# Altium footprint library WE-RJ45 LAN.PcbLib: 106 footprints (part 3 of 7)
Each footprint in its own frame and in the unit in brackets; x right, y up, seen from the top. Pads: shape width x height; smd on the part's side, far side on the other; paste and mask are expansions set on the pad; w line width, h text height; cw(c..) or ccw(c..) is an arc to the next point about the centre after c.
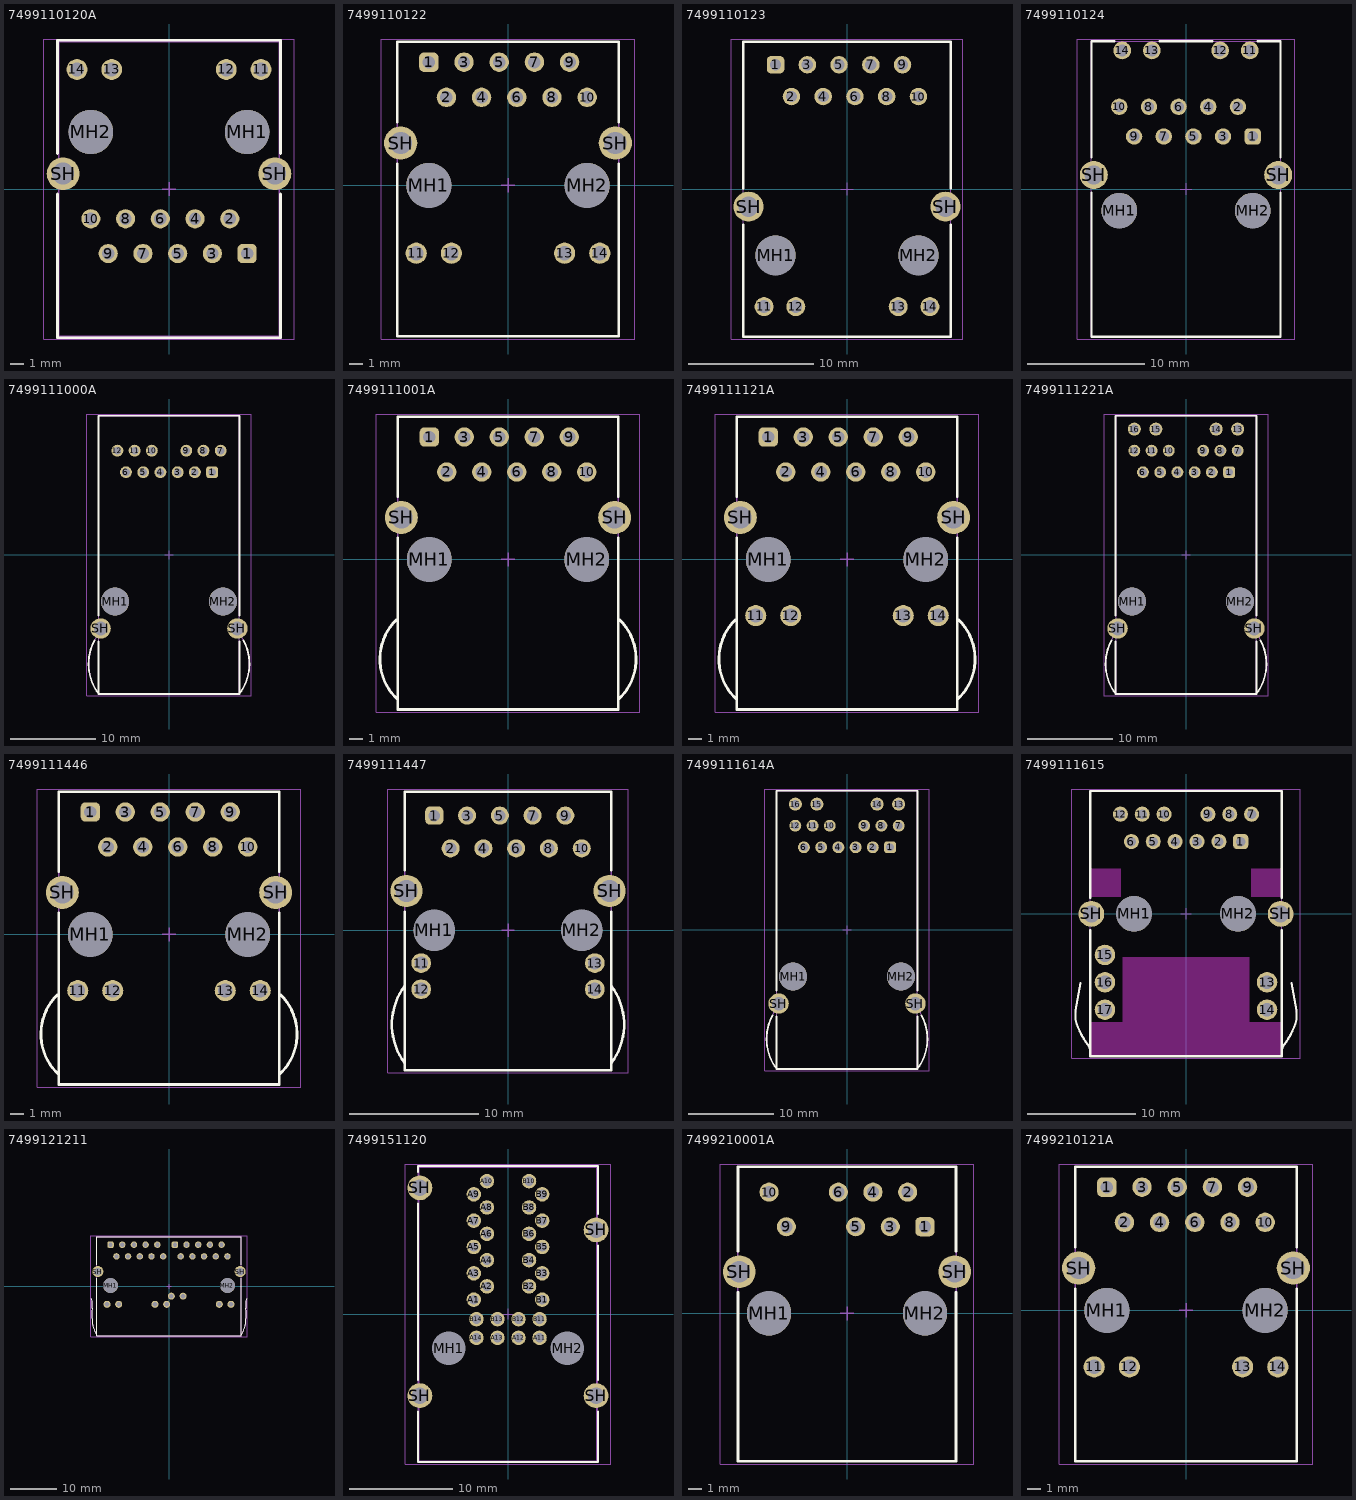
[diagram p2: the footprints below, top view; thin cyan lines are the x and y axes]

## 7499110120A [mm] "LAN Transformer, body 21.54 x 16.10 mm"
height 16.65
pads (18):
  rrect50% 1.4x1.4 hole 0.9: 1(5.715,-4.72)
  round 1.4 hole 0.9: 2(4.445,-2.18) 3(3.175,-4.72) 4(1.905,-2.18) 5(0.635,-4.72) 6(-0.635,-2.18) 7(-1.905,-4.72) 8(-3.175,-2.18) 9(-4.445,-4.72) 10(-5.715,-2.18)
  round 1.52 hole 1.02: 11(6.73,8.74) 12(4.19,8.74) 13(-4.19,8.74) 14(-6.73,8.74)
  round 3.25 hole 3.25 unplated: MH1(5.715,4.17) MH2(-5.715,4.17)
  round 2.4 hole 1.6: SH(-7.745,1.12) SH(7.745,1.12)
Top Overlay:
  lines w0.2: -8.15,-0.36 -8.15,-10.87 8.15,-10.87 8.15,-0.36 ; -8.15,2.6 -8.15,10.87 8.15,10.87 8.15,2.6
Top Assembly:
  lines w0.1: -8.05,-10.77 8.05,-10.77 8.05,10.77 -8.05,10.77 -8.05,-10.77
Top Designator:
  text ".Designator" at -3.647,-0.357 h1
Top 3D Body:
  lines w0.1: -8.05,-10.77 8.05,-10.77 8.05,10.77 -8.05,10.77 -8.05,-10.77
Top Courtyard:
  lines w0.05: -9.145,-10.97 9.145,-10.97 9.145,10.97 -9.145,10.97 -9.145,-10.97
Top Component Center:
  lines w0.1: -0.5,0 0.5,0 ; 0,-0.5 0,0.5
3D body "7499110120A.stp": height 16.69, standoff -3.3, extent -8.34,-10.77 8.34,10.77

## 7499110122 [mm] "Integrated RJ45 Transformer, THT, body 16.00 x 21.25 mm"
height 13.5
pads (18):
  rrect50% 1.4x1.4 hole 0.9: 1(-5.715,8.89)
  round 1.4 hole 0.9: 2(-4.445,6.35) 3(-3.175,8.89) 4(-1.905,6.35) 5(-0.635,8.89) 6(0.635,6.35) 7(1.905,8.89) 8(3.175,6.35) 9(4.445,8.89) 10(5.715,6.35)
  round 1.53 hole 1.03: 11(-6.625,-4.9) 12(-4.085,-4.9) 13(4.085,-4.9) 14(6.625,-4.9)
  round 3.25 hole 3.25 unplated: MH1(-5.715,0) MH2(5.715,0)
  round 2.4 hole 1.6: SH(-7.745,3.05) SH(7.745,3.05)
Top Overlay:
  lines w0.2: -8,1.55 -8,-10.89 8,-10.89 8,1.55 ; -8,4.55 -8,10.36 8,10.36 8,4.55
Top Assembly:
  lines w0.1: -8,-10.89 8,-10.89 8,10.36 -8,10.36 -8,-10.89
Top Designator:
  text ".Designator" at -3.647,-0.357 h1
Top 3D Body:
  lines w0.1: -8,-10.89 8,-10.89 8,10.36 -8,10.36 -8,-10.89
Top Courtyard:
  lines w0.05: -9.145,-11.09 9.145,-11.09 9.145,10.56 -9.145,10.56 -9.145,-11.09
Top Component Center:
  lines w0.1: -0.5,0 0.5,0 ; 0,-0.5 0,0.5
3D body "7499110122.stp": height 13.5, standoff -3.6, extent -8.15,-10.89 8.15,10.36

## 7499110123 [mm] "LAN Transformer, body 23.6x16.6mm"
height 17.1
pads (18):
  rrect50% 1.4x1.4 hole 0.89: 1(-5.715,9.94)
  round 1.4 hole 0.89: 2(-4.445,7.4) 3(-3.175,9.94) 4(-1.905,7.4) 5(-0.635,9.94) 6(0.635,7.4) 7(1.905,9.94) 8(3.175,7.4) 9(4.445,9.94) 10(5.715,7.4)
  round 1.52 hole 1.02: 11(-6.635,-9.41) 12(-4.095,-9.41) 13(4.095,-9.41) 14(6.635,-9.41)
  round 3.2 hole 3.2 unplated: MH1(-5.715,-5.3) MH2(5.715,-5.3)
  round 2.4 hole 1.63: SH(-7.875,-1.41) SH(7.875,-1.41)
Top Overlay:
  lines w0.2: -8.3,-2.85 -8.3,-11.8 8.3,-11.8 8.3,-2.85 ; -8.3,0.05 -8.3,11.8 8.3,11.8 8.3,0.05
Top Assembly:
  lines w0.1: -8.3,-11.8 8.3,-11.8 8.3,11.8 -8.3,11.8 -8.3,-11.8
Top Designator:
  text ".Designator" at -3.647,-0.357 h1
Top 3D Body:
  lines w0.1: -8.3,-11.8 8.3,-11.8 8.3,11.8 -8.3,11.8 -8.3,-11.8
Top Courtyard:
  lines w0.05: -9.275,-12 9.275,-12 9.275,12 -9.275,12 -9.275,-12
Top Component Center:
  lines w0.1: -0.5,0 0.5,0 ; 0,-0.5 0,0.5
3D body "7499110123.stp": height 17.15, standoff -2.75, extent -8.3,-11.8 8.3,11.8

## 7499110124 [mm] "LAN Transformer, body 25.3x16.2mm"
height 13.5
pads (18):
  rrect50% 1.4x1.4 hole 0.9: 1(5.715,4.5)
  round 1.4 hole 0.9: 2(4.445,7.04) 3(3.175,4.5) 4(1.905,7.04) 5(0.635,4.5) 6(-0.635,7.04) 7(-1.905,4.5) 8(-3.175,7.04) 9(-4.445,4.5) 10(-5.715,7.04)
  round 1.52 hole 1.02: 11(5.465,11.87) 12(2.925,11.87) 13(-2.925,11.87) 14(-5.465,11.87)
  round 3.05 hole 3.05 unplated: MH1(-5.715,-1.85) MH2(5.715,-1.85)
  round 2.4 hole 1.6: SH(-7.9,1.2) SH(7.9,1.2)
Top Overlay:
  lines w0.2: -8.1,-0.3 -8.1,-12.65 8.1,-12.65 8.1,-0.3 ; -8.1,2.7 -8.1,12.65 -6.15,12.65 ; -2.24,12.65 2.24,12.65 ; 6.15,12.65 8.1,12.65 8.1,2.7
Top Assembly:
  lines w0.1: -8.1,-12.65 -8.1,12.65 8.1,12.65 8.1,-12.65 -8.1,-12.65
Top Designator:
  text ".Designator" at -3.647,-0.357 h1
Top 3D Body:
  lines w0.1: -8.1,-12.65 -8.1,12.65 8.1,12.65 8.1,-12.65 -8.1,-12.65
Top Courtyard:
  lines w0.05: -9.3,-12.85 -9.3,12.85 9.3,12.85 9.3,-12.85 -9.3,-12.85
Top Component Center:
  lines w0.1: -0.5,0 0.5,0 ; 0,-0.5 0,0.5
3D body "7499110124.stp": height 13.6, standoff -3.45, extent -8.2,-12.65 8.2,12.65

## 7499111000A [mm] "LAN Transformer, body 33.02x16.79mm"
height 15.79
pads (16):
  rrect50% 1.4x1.4 hole 0.9: 1(5.08,9.74)
  round 1.4 hole 0.9: 2(3.05,9.74) 3(1.02,9.74) 4(-1.01,9.74) 5(-3.04,9.74) 6(-5.07,9.74) 7(6.095,12.28) 8(4.065,12.28) 9(2.035,12.28) 10(-2.025,12.28) 11(-4.055,12.28) 12(-6.085,12.28)
  round 3.3 hole 3.3 unplated: MH1(-6.35,-5.5) MH2(6.35,-5.5)
  round 2.4 hole 1.6: SH(-8.065,-8.68) SH(8.065,-8.68)
Top Overlay:
  lines w0.2: -8.776,-10.059 ccw(c-3.579,-12.857) -8.3,-16.4 ; -8.3,-10.2 -8.3,-16.4 ; -8.3,-7.16 -8.3,16.4 8.3,16.4 8.3,-7.16 ; 8.3,-10.2 8.3,-16.4 ; 8.776,-10.059 cw(c3.579,-12.857) 8.3,-16.4 ; -8.3,-16.4 8.3,-16.4
Top Assembly:
  lines w0.1: -8.3,-9.315 ccw(c-3.579,-12.857) -8.3,-16.4 ; 8.3,-9.315 cw(c3.579,-12.857) 8.3,-16.4 ; -8.3,-16.4 -8.3,16.4 8.3,16.4 8.3,-16.4 ; -8.3,-16.4 8.3,-16.4
Top Designator:
  text ".Designator" at -3.647,-0.357 h1
Top 3D Body:
  lines w0.1: -8.3,-9.315 ccw(c-3.579,-12.857) -8.3,-16.4 ; 8.3,-9.315 cw(c3.579,-12.857) 8.3,-16.4 ; -8.3,-16.4 -8.3,16.4 8.3,16.4 8.3,-16.4 ; -8.3,-16.4 8.3,-16.4
Top Courtyard:
  lines w0.05: -9.693,-16.6 -9.693,16.6 9.693,16.6 9.693,-16.6 -9.693,-16.6
Top Component Center:
  lines w0.1: -0.5,0 0.5,0 ; 0,-0.5 0,0.5
3D body "7499111000A.stp": height 15.39, standoff -3.1, extent -9.493,-16.4 9.493,16.4

## 7499111001A [mm] "Integrated RJ45 Transformer, THT, body 16.00 x 21.25 mm"
height 13.5
pads (14):
  rrect50% 1.4x1.4 hole 0.9: 1(-5.715,8.89)
  round 1.4 hole 0.9: 2(-4.445,6.35) 3(-3.175,8.89) 4(-1.905,6.35) 5(-0.635,8.89) 6(0.635,6.35) 7(1.905,8.89) 8(3.175,6.35) 9(4.445,8.89) 10(5.715,6.35)
  round 3.25 hole 3.25 unplated: MH1(-5.715,0) MH2(5.715,0)
  round 2.4 hole 1.6: SH(-7.745,3.05) SH(7.745,3.05)
Top Overlay:
  lines w0.2: -8.099,-4.377 ccw(c-5.31,-7.23) -8.001,-10.176 ; -8,1.55 -8,-10.89 8,-10.89 8,1.55 ; -8,4.55 -8,10.36 8,10.36 8,4.55 ; 8.001,-10.176 ccw(c5.31,-7.23) 8.099,-4.377
Top Assembly:
  lines w0.1: -8.099,-4.377 ccw(c-5.31,-7.23) -8.001,-10.176 ; 8.001,-10.176 ccw(c5.31,-7.23) 8.099,-4.377 ; -8,-10.89 8,-10.89 8,10.36 -8,10.36 -8,-10.89
Top Designator:
  text ".Designator" at -3.647,-0.357 h1
Top 3D Body:
  lines w0.1: -8.099,-4.377 ccw(c-5.31,-7.23) -8.001,-10.176 ; 8.001,-10.176 ccw(c5.31,-7.23) 8.099,-4.377 ; -8,-10.89 8,-10.89 8,10.36 -8,10.36 -8,-10.89
Top Courtyard:
  lines w0.05: -9.548,-11.09 9.548,-11.09 9.548,10.56 -9.548,10.56 -9.548,-11.09
Top Component Center:
  lines w0.1: -0.5,0 0.5,0 ; 0,-0.5 0,0.5
3D body "7499111001A.stp": height 14.85, standoff -3.6, extent -9.348,-10.89 9.348,10.36

## 7499111121A [mm] "Integrated RJ45 Transformer, THT, body 16.00 x 21.25 mm"
height 13.5
pads (18):
  rrect50% 1.4x1.4 hole 0.9: 1(-5.715,8.89)
  round 1.4 hole 0.9: 2(-4.445,6.35) 3(-3.175,8.89) 4(-1.905,6.35) 5(-0.635,8.89) 6(0.635,6.35) 7(1.905,8.89) 8(3.175,6.35) 9(4.445,8.89) 10(5.715,6.35)
  round 1.53 hole 1.03: 11(-6.625,-4.08) 12(-4.085,-4.08) 13(4.085,-4.08) 14(6.625,-4.08)
  round 3.25 hole 3.25 unplated: MH1(-5.715,0) MH2(5.715,0)
  round 2.4 hole 1.6: SH(-7.745,3.05) SH(7.745,3.05)
Top Overlay:
  lines w0.2: -8.099,-4.377 ccw(c-5.31,-7.23) -8.001,-10.176 ; -8,1.55 -8,-10.89 8,-10.89 8,1.55 ; -8,4.55 -8,10.36 8,10.36 8,4.55 ; 8.001,-10.176 ccw(c5.31,-7.23) 8.099,-4.377
Top Assembly:
  lines w0.1: -8.099,-4.377 ccw(c-5.31,-7.23) -8.001,-10.176 ; 8.001,-10.176 ccw(c5.31,-7.23) 8.099,-4.377 ; -8,-10.89 8,-10.89 8,10.36 -8,10.36 -8,-10.89
Top Designator:
  text ".Designator" at -3.647,-0.357 h1
Top 3D Body:
  lines w0.1: -8.099,-4.377 ccw(c-5.31,-7.23) -8.001,-10.176 ; 8.001,-10.176 ccw(c5.31,-7.23) 8.099,-4.377 ; -8,-10.89 8,-10.89 8,10.36 -8,10.36 -8,-10.89
Top Courtyard:
  lines w0.05: -9.548,-11.09 9.548,-11.09 9.548,10.56 -9.548,10.56 -9.548,-11.09
Top Component Center:
  lines w0.1: -0.5,0 0.5,0 ; 0,-0.5 0,0.5
3D body "7499111121A.stp": height 14.85, standoff -3.6, extent -9.348,-10.89 9.348,10.36

## 7499111221A [mm] "LAN Transformer, body 33.02x16.79mm"
height 15.79
pads (20):
  rrect50% 1.4x1.4 hole 0.9: 1(5.08,9.74)
  round 1.4 hole 0.9: 2(3.05,9.74) 3(1.02,9.74) 4(-1.01,9.74) 5(-3.04,9.74) 6(-5.07,9.74) 7(6.09,12.28) 8(4.06,12.28) 9(2.03,12.28) 10(-2.03,12.28) 11(-4.06,12.28) 12(-6.09,12.28)
  round 1.53 hole 1.03: 13(6.09,14.82) 14(3.55,14.82) 15(-3.55,14.82) 16(-6.09,14.82)
  round 3.3 hole 3.3 unplated: MH1(-6.35,-5.5) MH2(6.35,-5.5)
  round 2.4 hole 1.6: SH(-8.065,-8.68) SH(8.065,-8.68)
Top Overlay:
  lines w0.2: -8.776,-10.059 ccw(c-3.579,-12.857) -8.3,-16.4 ; -8.3,-10.2 -8.3,-16.4 ; -8.3,-7.16 -8.3,16.4 8.3,16.4 8.3,-7.16 ; 8.3,-10.2 8.3,-16.4 ; 8.776,-10.059 cw(c3.579,-12.857) 8.3,-16.4 ; -8.3,-16.4 8.3,-16.4
Top Assembly:
  lines w0.1: -8.638,-9.278 cw(c-9.287,-9.54) -8.678,-9.884 ccw(c-3.579,-12.857) -8.3,-16.4 ; 8.638,-9.278 ccw(c9.287,-9.54) 8.678,-9.884 cw(c3.579,-12.857) 8.3,-16.4 ; -8.3,-16.4 8.3,-16.4 ; -8.3,-16.4 -8.3,16.4 8.3,16.4 8.3,-16.4
Top Designator:
  text ".Designator" at -3.647,-0.357 h1
Top 3D Body:
  lines w0.1: -8.638,-9.278 cw(c-9.287,-9.54) -8.678,-9.884 ccw(c-3.579,-12.857) -8.3,-16.4 ; 8.638,-9.278 ccw(c9.287,-9.54) 8.678,-9.884 cw(c3.579,-12.857) 8.3,-16.4 ; -8.3,-16.4 8.3,-16.4 ; -8.3,-16.4 -8.3,16.4 8.3,16.4 8.3,-16.4
Top Courtyard:
  lines w0.05: -9.7,-16.6 9.7,-16.6 9.7,16.6 -9.7,16.6 -9.7,-16.6
Top Component Center:
  lines w0.1: -0.5,0 0.5,0 ; 0,-0.5 0,0.5
3D body "7499111221A.stp": height 15.03, standoff -3.46, extent -9.5,-16.4 9.5,16.4

## 7499111446 [mm] "Integrated RJ45 Transformer, THT, body 16.00 x 21.25 mm"
height 13.5
pads (18):
  rrect50% 1.4x1.4 hole 0.9: 1(-5.715,8.89)
  round 1.4 hole 0.9: 2(-4.445,6.35) 3(-3.175,8.89) 4(-1.905,6.35) 5(-0.635,8.89) 6(0.635,6.35) 7(1.905,8.89) 8(3.175,6.35) 9(4.445,8.89) 10(5.715,6.35)
  round 1.53 hole 1.03: 11(-6.625,-4.08) 12(-4.085,-4.08) 13(4.085,-4.08) 14(6.625,-4.08)
  round 3.25 hole 3.25 unplated: MH1(-5.715,0) MH2(5.715,0)
  round 2.4 hole 1.6: SH(-7.745,3.05) SH(7.745,3.05)
Top Overlay:
  lines w0.2: -8.099,-4.377 ccw(c-5.31,-7.23) -8.001,-10.176 ; -8,1.55 -8,-10.89 8,-10.89 8,1.55 ; -8,4.55 -8,10.36 8,10.36 8,4.55 ; 8.001,-10.176 ccw(c5.31,-7.23) 8.099,-4.377
Top Assembly:
  lines w0.1: -8.099,-4.377 ccw(c-5.31,-7.23) -8.001,-10.176 ; 8.001,-10.176 ccw(c5.31,-7.23) 8.099,-4.377 ; -8,-10.89 8,-10.89 8,10.36 -8,10.36 -8,-10.89
Top Designator:
  text ".Designator" at -3.647,-0.357 h1
Top 3D Body:
  lines w0.1: -8.099,-4.377 ccw(c-5.31,-7.23) -8.001,-10.176 ; 8.001,-10.176 ccw(c5.31,-7.23) 8.099,-4.377 ; -8,-10.89 8,-10.89 8,10.36 -8,10.36 -8,-10.89
Top Courtyard:
  lines w0.05: -9.548,-11.09 9.548,-11.09 9.548,10.56 -9.548,10.56 -9.548,-11.09
Top Component Center:
  lines w0.1: -0.5,0 0.5,0 ; 0,-0.5 0,0.5
3D body "7499111446.stp": height 14.85, standoff -3.6, extent -9.348,-10.89 9.348,10.36

## 7499111447 [mm] "LAN Transformer, body 21.3x16mm"
height 13.55
pads (18):
  rrect50% 1.4x1.4 hole 0.89: 1(-5.715,8.89)
  round 1.4 hole 0.89: 2(-4.445,6.35) 3(-3.175,8.89) 4(-1.905,6.35) 5(-0.635,8.89) 6(0.635,6.35) 7(1.905,8.89) 8(3.175,6.35) 9(4.445,8.89) 10(5.715,6.35)
  round 1.52 hole 1.02: 11(-6.725,-2.54) 12(-6.725,-4.57) 13(6.725,-2.54) 14(6.725,-4.57)
  round 3.2 hole 3.2 unplated: MH1(-5.715,0) MH2(5.715,0)
  round 2.5 hole 1.7: SH(-7.875,3.05) SH(7.875,3.05)
Top Overlay:
  lines w0.2: -8,-10.3 cw(c-4,-7.3) -8,-4.3 ; -8,1.45 -8,-10.85 8,-10.85 8,1.45 ; -8,4.65 -8,10.75 8,10.75 8,4.65 ; 8,-10.3 ccw(c4,-7.3) 8,-4.3
Top Assembly:
  lines w0.1: -8,-10.3 cw(c-4,-7.3) -8,-4.3 ; 8,-10.3 ccw(c4,-7.3) 8,-4.3 ; -8,-10.85 -8,10.75 8,10.75 8,-10.85 -8,-10.85
Top Designator:
  text ".Designator" at -3.647,-0.357 h1
Top 3D Body:
  lines w0.1: -8,-10.3 cw(c-4,-7.3) -8,-4.3 ; 8,-10.3 ccw(c4,-7.3) 8,-4.3 ; -8,-10.85 -8,10.75 8,10.75 8,-10.85 -8,-10.85
Top Courtyard:
  lines w0.05: -9.325,-11.05 9.325,-11.05 9.325,10.95 -9.325,10.95 -9.325,-11.05
Top Component Center:
  lines w0.1: -0.5,0 0.5,0 ; 0,-0.5 0,0.5
3D body "7499111447.stp": height 14.65, standoff -2.98, extent -8.956,-10.85 8.956,10.75

## 7499111614A [mm] "LAN Transformer, body 33.02x16.87mm"
height 13.87
pads (20):
  rrect50% 1.4x1.4 hole 0.9: 1(5.075,9.73)
  round 1.4 hole 0.9: 2(3.045,9.73) 3(1.015,9.73) 4(-1.015,9.73) 5(-3.045,9.73) 6(-5.075,9.73) 7(6.09,12.27) 8(4.06,12.27) 9(2.03,12.27) 10(-2.03,12.27) 11(-4.06,12.27) 12(-6.09,12.27)
  round 1.53 hole 1.03: 13(6.09,14.81) 14(3.55,14.81) 15(-3.55,14.81) 16(-6.09,14.81)
  round 3.3 hole 3.3 unplated: MH1(-6.35,-5.51) MH2(6.35,-5.51)
  round 2.4 hole 1.6: SH(-8.065,-8.69) SH(8.065,-8.69)
Top Overlay:
  lines w0.2: -8.776,-10.059 ccw(c-3.579,-12.857) -8.3,-16.4 ; -8.3,-10.2 -8.3,-16.4 ; -8.3,-7.18 -8.3,16.39 8.3,16.39 8.3,-7.18 ; 8.3,-10.2 8.3,-16.4 ; 8.776,-10.059 cw(c3.579,-12.857) 8.3,-16.4 ; -8.3,-16.4 8.3,-16.4
Top Assembly:
  lines w0.1: -8.638,-9.278 cw(c-9.287,-9.54) -8.678,-9.884 ccw(c-3.579,-12.857) -8.3,-16.4 ; 8.638,-9.278 ccw(c9.287,-9.54) 8.678,-9.884 cw(c3.579,-12.857) 8.3,-16.4 ; -8.3,-16.4 8.3,-16.4 ; -8.3,-16.4 -8.3,16.39 8.3,16.39 8.3,-16.4
Top Designator:
  text ".Designator" at -3.647,-0.357 h1
Top 3D Body:
  lines w0.1: -8.638,-9.278 cw(c-9.287,-9.54) -8.678,-9.884 ccw(c-3.579,-12.857) -8.3,-16.4 ; 8.638,-9.278 ccw(c9.287,-9.54) 8.678,-9.884 cw(c3.579,-12.857) 8.3,-16.4 ; -8.3,-16.4 8.3,-16.4 ; -8.3,-16.4 -8.3,16.39 8.3,16.39 8.3,-16.4
Top Courtyard:
  lines w0.05: -9.7,-16.6 -9.7,16.6 9.7,16.6 9.7,-16.6 -9.7,-16.6
Top Component Center:
  lines w0.1: -0.5,0 0.5,0 ; 0,-0.5 0,0.5
3D body "7499111614A.stp": height 15.1, standoff -3.4, extent -9.5,-16.4 9.5,16.4

## 7499111615 [mm] "10/100/1000Base-T, THT, 1x1, Tab up, with shield tabs, with LED L-R green/orange-yellow, ETR, low profile"
height 11.3
pads (21):
  rrect50% 1.4x1.4 hole 0.89: 1(5.08,6.71)
  round 1.4 hole 0.89: 2(3.05,6.71) 3(1.02,6.71) 4(-1.01,6.71) 5(-3.04,6.71) 6(-5.07,6.71) 7(6.09,9.25) 8(4.06,9.25) 9(2.03,9.25) 10(-2.03,9.25) 11(-4.06,9.25) 12(-6.09,9.25)
  round 1.9 hole 1.27: 13(7.52,-6.35) 14(7.52,-8.89) 15(-7.52,-3.81) 16(-7.52,-6.35) 17(-7.52,-8.89)
  round 3.3 hole 3.3 unplated: MH1(-4.825,0) MH2(4.825,0)
  round 2.4 hole 1.57: SH(-8.79,0) SH(8.79,0)
Top Overlay:
  lines w0.2: -9.803,-6.408 -10.253,-8.957 ccw(c-3.459,-9.443) -10.261,-9.802 ccw(c-3.781,-8.079) -9.271,-11.929 cw(c-10.549,-13.09) -8.89,-12.61 ; -8.89,-1.5 -8.89,-13.21 8.89,-13.21 8.89,-1.5 ; -8.89,1.5 -8.89,11.39 8.89,11.39 8.89,1.5 ; 8.89,-12.61 cw(c10.549,-13.09) 9.271,-11.929 ccw(c3.781,-8.079) 10.261,-9.802 ccw(c3.459,-9.443) 10.253,-8.957 9.803,-6.408
Keep-Out Layer:
  region: 8.89,4.2 6.075,4.2 6.075,1.59 8.89,1.59
  region: -8.89,4.2 -6.075,4.2 -6.075,1.59 -8.89,1.59
  region: -5.88,-4.01 5.88,-4.01 5.88,-10.04 8.89,-10.04 8.89,-13.21 -8.89,-13.21 -8.89,-10.04 -5.88,-10.04
Top Assembly:
  lines w0.1: -9.803,-6.408 -10.253,-8.957 ccw(c-3.459,-9.443) -10.261,-9.802 ccw(c-3.781,-8.079) -9.271,-11.929 cw(c-10.549,-13.09) -8.89,-12.61 ; 8.89,-12.61 cw(c10.549,-13.09) 9.271,-11.929 ccw(c3.781,-8.079) 10.261,-9.802 ccw(c3.459,-9.443) 10.253,-8.957 9.803,-6.408 ; -8.89,-13.21 8.89,-13.21 8.89,11.39 -8.89,11.39 -8.89,-13.21
Top Designator:
  text ".Designator" at -3.647,-0.357 h1
Top 3D Body:
  lines w0.1: -9.803,-6.408 -10.253,-8.957 ccw(c-3.459,-9.443) -10.261,-9.802 ccw(c-3.781,-8.079) -9.271,-11.929 cw(c-10.549,-13.09) -8.89,-12.61 ; 8.89,-12.61 cw(c10.549,-13.09) 9.271,-11.929 ccw(c3.781,-8.079) 10.261,-9.802 ccw(c3.459,-9.443) 10.253,-8.957 9.803,-6.408 ; -8.89,-13.21 8.89,-13.21 8.89,11.39 -8.89,11.39 -8.89,-13.21
Top Courtyard:
  lines w0.05: -10.587,-13.41 -10.587,11.59 10.587,11.59 10.587,-13.41 -10.587,-13.41
Top Component Center:
  lines w0.1: -0.5,0 0.5,0 ; 0,-0.5 0,0.5
3D body "7499111615.stp": height 12.85, standoff -3.25, extent -10.387,-13.21 10.387,11.39

## 7499121211 [mm] "10/100/1000Base-T, THT, 1x2, Tab down, with shield tabs, with LED L-R green-yellow, ETR"
height 15.71
pads (32):
  rrect50% 1.4x1.4 hole 0.89: A1(-12.7,9.04) B1(1.27,9.04)
  round 1.4 hole 0.89: A2(-11.43,6.5) A3(-10.16,9.04) A4(-8.89,6.5) A5(-7.62,9.04) A6(-6.35,6.5) A7(-5.08,9.04) A8(-3.81,6.5) A9(-2.54,9.04) A10(-1.27,6.5) B2(2.54,6.5) B3(3.81,9.04) B4(5.08,6.5) B5(6.35,9.04) B6(7.62,6.5) B7(8.89,9.04) B8(10.16,6.5) B9(11.43,9.04) B10(12.7,6.5)
  round 1.52 hole 1.02: A11(-13.47,-3.91) A12(-10.93,-3.91) A13(-3.05,-3.91) A14(-0.51,-3.91) B11(0.51,-2.14) B12(3.05,-2.14) B13(10.93,-3.91) B14(13.47,-3.91)
  round 3.25 hole 3.25 unplated: MH1(-12.7,0.15) MH2(12.7,0.15)
  round 2.4 hole 1.63: SH(-15.465,3.2) SH(15.465,3.2)
Top Overlay:
  lines w0.2: -16.862,-2.641 cw(c-17.973,-3.253) -16.706,-3.31 -16.713,-4.722 ccw(c-13.098,-5.162) -16.74,-5.192 ccw(c7.924,-6.02) -16.669,-8.064 ccw(c-8.25,-6.545) -15.7,-10.75 ; -15.7,1.75 -15.7,-10.75 ; -15.7,4.65 -15.7,10.75 15.7,10.75 15.7,4.65 ; 15.7,1.75 15.7,-10.75 ; 16.862,-2.641 ccw(c17.973,-3.253) 16.706,-3.31 16.713,-4.722 cw(c13.098,-5.162) 16.74,-5.192 cw(c-7.924,-6.02) 16.669,-8.064 cw(c8.25,-6.545) 15.7,-10.75 ; -15.7,-10.75 15.7,-10.75
Top Assembly:
  lines w0.1: -16.862,-2.641 cw(c-17.973,-3.253) -16.706,-3.31 -16.713,-4.722 ccw(c-13.098,-5.162) -16.74,-5.192 ccw(c7.924,-6.02) -16.669,-8.064 ccw(c-8.25,-6.545) -15.7,-10.75 ; 16.862,-2.641 ccw(c17.973,-3.253) 16.706,-3.31 16.713,-4.722 cw(c13.098,-5.162) 16.74,-5.192 cw(c-7.924,-6.02) 16.669,-8.064 cw(c8.25,-6.545) 15.7,-10.75 ; -15.7,-10.75 -15.7,10.75 15.7,10.75 15.7,-10.75 ; -15.7,-10.75 15.7,-10.75
Top Designator:
  text ".Designator" at -3.647,-0.357 h1
Top 3D Body:
  lines w0.1: -16.862,-2.641 cw(c-17.973,-3.253) -16.706,-3.31 -16.713,-4.722 ccw(c-13.098,-5.162) -16.74,-5.192 ccw(c7.924,-6.02) -16.669,-8.064 ccw(c-8.25,-6.545) -15.7,-10.75 ; 16.862,-2.641 ccw(c17.973,-3.253) 16.706,-3.31 16.713,-4.722 cw(c13.098,-5.162) 16.74,-5.192 cw(c-7.924,-6.02) 16.669,-8.064 cw(c8.25,-6.545) 15.7,-10.75 ; -15.7,-10.75 -15.7,10.75 15.7,10.75 15.7,-10.75 ; -15.7,-10.75 15.7,-10.75
Top Courtyard:
  lines w0.05: -17.062,-10.95 17.062,-10.95 17.062,10.95 -17.062,10.95 -17.062,-10.95
Top Component Center:
  lines w0.1: -0.5,0 0.5,0 ; 0,-0.5 0,0.5
3D body "7499121211.stp": height 14.77, standoff -3.7, extent -16.923,-10.75 16.923,10.75

## 7499151120 [mm] "LAN Transformer, body 28.3x17.09mm"
height 25.25
pads (34):
  round 1.4 hole 0.9: A1(-3.3,1.39) A2(-2.03,2.66) A3(-3.3,3.93) A4(-2.03,5.2) A5(-3.3,6.47) A6(-2.03,7.74) A7(-3.3,9.01) A8(-2.03,10.28) A9(-3.3,11.55) A10(-2.03,12.82) A11(3.045,-2.3) A12(1.015,-2.3) A13(-1.015,-2.3) A14(-3.045,-2.3) B1(3.3,1.39) B2(2.03,2.66) B3(3.3,3.93) B4(2.03,5.2) B5(3.3,6.47) B6(2.03,7.74) B7(3.3,9.01) B8(2.03,10.28) B9(3.3,11.55) B10(2.03,12.82) B11(3.045,-0.5) B12(1.015,-0.5) B13(-1.015,-0.5) B14(-3.045,-0.5)
  round 3.15 hole 3.25 unplated: MH1(-5.715,-3.31) MH2(5.715,-3.31)
  round 2.4 hole 1.6: SH(-8.505,-7.88) SH(-8.505,12.18) SH(8.505,-7.88) SH(8.505,8.12)
Top Overlay:
  lines w0.2: -8.67,-9.4 -8.67,-14.275 8.67,-14.275 8.67,-9.4 ; -8.67,-6.35 -8.67,10.66 ; -8.67,13.7 -8.67,14.275 8.67,14.275 8.67,9.64 ; 8.67,-6.36 8.67,6.6
Top Assembly:
  lines w0.1: -8.67,-14.275 -8.67,14.275 8.67,14.275 8.67,-14.275 -8.67,-14.275
Top Designator:
  text ".Designator" at -3.647,-0.357 h1
Top 3D Body:
  lines w0.1: -8.545,-14.15 8.545,-14.15 8.545,14.15 -8.545,14.15 -8.545,-14.15
Top Courtyard:
  lines w0.05: -9.905,-14.475 9.905,-14.475 9.905,14.475 -9.905,14.475 -9.905,-14.475
Top Component Center:
  lines w0.1: -0.5,0 0.5,0 ; 0,-0.5 0,0.5
3D body "7499151120.stp": height 26.72, standoff -3.82, extent -9.703,-14.15 9.703,14.3

## 7499210001A [mm] "LAN Transformer, body 21.84x16mm"
height 13.74
pads (12):
  rrect50% 1.4x1.4 hole 0.89: 1(5.715,6.35)
  round 1.4 hole 0.89: 2(4.445,8.89) 3(3.175,6.35) 4(1.905,8.89) 5(0.635,6.35) 6(-0.635,8.89) 9(-4.445,6.35) 10(-5.715,8.89)
  round 3.25 hole 3.25 unplated: MH1(-5.715,0) MH2(5.715,0)
  round 2.4 hole 1.6: SH(-7.9,3.05) SH(7.9,3.05)
Top Overlay:
  lines w0.2: -8,1.55 -8,-10.85 8,-10.85 8,1.55 ; -8,4.55 -8,10.75 8,10.75 8,4.55
Top Assembly:
  lines w0.1: -8,-10.85 8,-10.85 8,10.75 -8,10.75 -8,-10.85
Top Designator:
  text ".Designator" at -3.647,-0.357 h1
Top 3D Body:
  lines w0.1: -8,-10.85 8,-10.85 8,10.75 -8,10.75 -8,-10.85
Top Courtyard:
  lines w0.05: -9.3,-11.05 -9.3,10.95 9.3,10.95 9.3,-11.05 -9.3,-11.05
Top Component Center:
  lines w0.1: -0.5,0 0.5,0 ; 0,-0.5 0,0.5
3D body "7499210001A.stp": height 13.78, standoff -2.62, extent -8.1,-10.85 8.1,10.75

## 7499210121A [mm] "Integrated RJ45 Transformer, THT, body 16.00 x 21.25 mm"
height 13.5
pads (18):
  rrect50% 1.4x1.4 hole 0.9: 1(-5.715,8.89)
  round 1.4 hole 0.9: 2(-4.445,6.35) 3(-3.175,8.89) 4(-1.905,6.35) 5(-0.635,8.89) 6(0.635,6.35) 7(1.905,8.89) 8(3.175,6.35) 9(4.445,8.89) 10(5.715,6.35)
  round 1.53 hole 1.03: 11(-6.625,-4.08) 12(-4.085,-4.08) 13(4.085,-4.08) 14(6.625,-4.08)
  round 3.25 hole 3.25 unplated: MH1(-5.715,0) MH2(5.715,0)
  round 2.4 hole 1.6: SH(-7.745,3.05) SH(7.745,3.05)
Top Overlay:
  lines w0.2: -8,1.55 -8,-10.89 8,-10.89 8,1.55 ; -8,4.55 -8,10.36 8,10.36 8,4.55
Top Assembly:
  lines w0.1: -8,-10.89 -8,10.36 8,10.36 8,-10.89 -8,-10.89
Top Designator:
  text ".Designator" at -3.647,-0.357 h1
Top 3D Body:
  lines w0.1: -8,-10.89 -8,10.36 8,10.36 8,-10.89 -8,-10.89
Top Courtyard:
  lines w0.05: -9.145,-11.09 -9.145,10.56 9.145,10.56 9.145,-11.09 -9.145,-11.09
Top Component Center:
  lines w0.1: -0.5,0 0.5,0 ; 0,-0.5 0,0.5
3D body "7499210121A.stp": height 13.5, standoff -3.6, extent -8.15,-10.89 8.15,10.36